# Altium footprint library Smart_Gateway_Rev1.0.PcbLib: 50 footprints (part 4 of 4)
Each footprint in its own frame and in the unit in brackets; x right, y up, seen from the top. Pads: shape width x height; smd on the part's side, far side on the other; paste and mask are expansions set on the pad; w line width, h text height; cw(c..) or ccw(c..) is an arc to the next point about the centre after c.
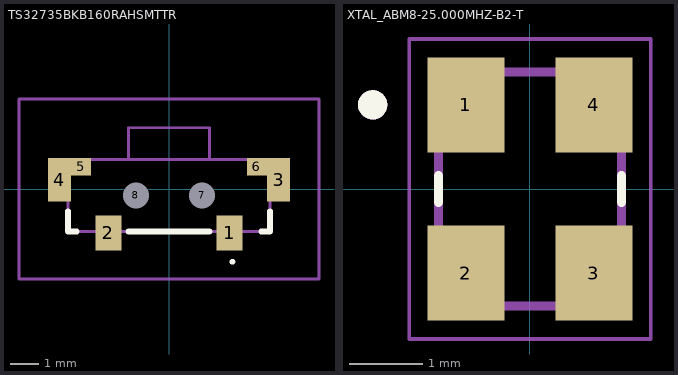
[diagram p3: the footprints below, top view; thin cyan lines are the x and y axes]

## TS32735BKB160RAHSMTTR [mm]
pads (8):
  rect 0.9x1.2 smd: 1(2.1,-1.525) 2(-2.1,-1.525)
  rect 0.8x1.5 smd: 3(3.8,0.325) 4(-3.8,0.325)
  rect 0.7x0.6 smd: 5(-3.05,0.775) 6(3.05,0.775)
  round 0.45 hole 0.9 unplated: 7(1.15,-0.225) 8(-1.15,-0.225)
Top Overlay:
  lines w0.1: 2.2,-2.575 cw(c2.2,-2.525) 2.2,-2.475 cw(c2.2,-2.525) 2.2,-2.575
  lines w0.2: -3.5,-0.775 -3.5,-1.475 -3.2,-1.475 ; -1.4,-1.475 1.4,-1.475 ; 3.2,-1.475 3.5,-1.475 3.5,-0.775
Mechanical 13:
  lines w0.1: -3.5,-1.475 -3.5,1.025 3.5,1.025 3.5,-1.475 -3.5,-1.475 ; -1.4,1.025 1.4,1.025 1.4,2.125 -1.4,2.125 -1.4,1.025
Mechanical 15:
  lines w0.1: -5.2,-3.125 -5.2,3.125 5.2,3.125 5.2,-3.125 -5.2,-3.125
3D body "TS32-7-35-BK-B-260-RA-SMT-TR.stp": height 3.52, standoff -0.75, extent -3.9,-2 3.9,1.87

## XTAL_ABM8-25.000MHZ-B2-T [mm]
height 0.8
pads (4):
  rect 1.05x1.3 smd: 1(-0.875,1.15) 2(-0.875,-1.15) 3(0.875,-1.15) 4(0.875,1.15)
Top Overlay:
  circle w0.2: c-2.15,1.15 r0.1
  lines w0.127: -1.25,-0.18 -1.25,0.18 ; 1.25,-0.18 1.25,0.18
Mechanical 13:
  circle w0.2: c-2.15,1.15 r0.1
  lines w0.127: -1.25,-1.6 -1.25,1.6 1.25,1.6 1.25,-1.6 -1.25,-1.6
Mechanical 15:
  lines w0.05: -1.65,-2.05 -1.65,2.05 1.65,2.05 1.65,-2.05 -1.65,-2.05
3D body "step_temp.STEP": height 0.8, standoff 0, extent -1.25,-1.6 1.25,1.6